# Altium schematic symbol library DSP扩展板.SCHLIB: 21 symbols
Pins are listed as number, name and electrical type; pins without a type are passive.

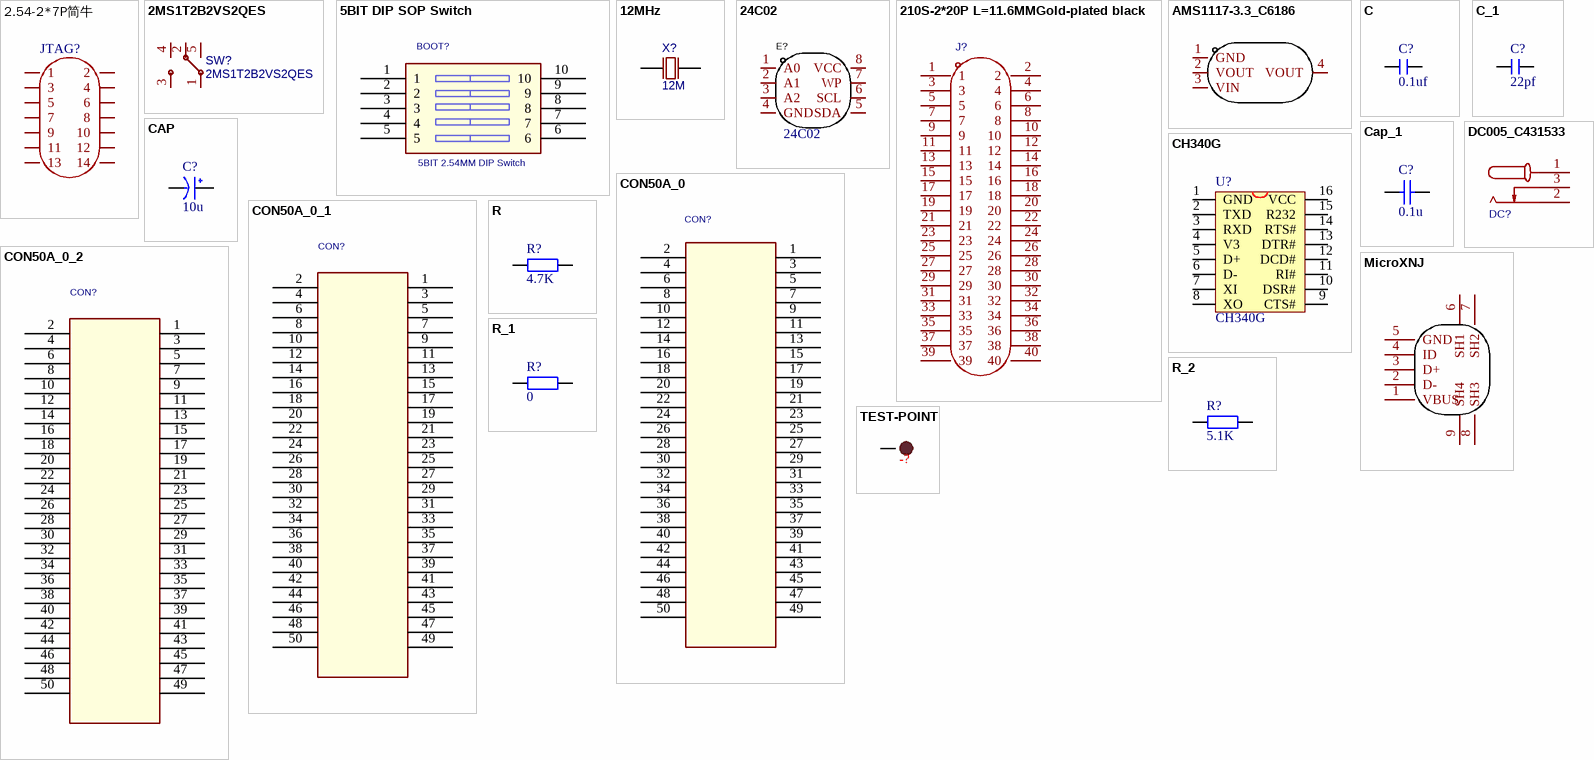
[diagram p0: symbols 2.54-2*7P简牛 to TEST-POINT]

## 2.54-2*7P简牛
designator JTAG?
Manufacturer: BOOMELE(博穆精密); Symbol: HDR-IDC-2.54-2X7P; Device: 2.54-2*7P简牛; Add into BOM: yes; Connector Type: 简牛座; Pitch: 2.54mm; Structure: 2x7P; Holder Type: 直插; Pin Number in each Row: 7; LCSC Part Name: 2.54mm 2x7P 排数:2 每排P数:7; Supplier Part: C11215; Manufacturer Part: 2.54-2*7P简牛; Supplier Footprint: 插件,P=2.54mm; JLCPCB Part Class: 扩展库; Datasheet: https://atta.szlcsc.com/upload/public/pdf/source/20131122/1457706661483.pdf; Supplier: LCSC; Convert to PCB: yes; Row Spacing: 2.54mm; Number of Rows: 2; Contact Material: 黄铜; Contact Plating: 金
footprint IDC-TH_14P-P2.54-V-R2-C7-S2.54
3D model IDC-TH_14P-P2.54-V-R2-C7-S2.54
pins: 1, 2, 3, 4, 5, 6, 7, 8, 9, 10, 11, 12, 13, 14

## 2MS1T2B2VS2QES
designator SW?
BOM_Manufacturer: Dailywell; Contributor: LCSC; BOM_Supplier: LCSC; BOM_Supplier Part: C545202; BOM_Manufacturer Part: 2MS1T2B2VS2QES; BOM_JLCPCB Part Class: Extended Part; spicePre: S; spiceSymbolName: 2MS1T2B2VS2QES
footprint SW-TH_2MS1T2B2VS2QES
pins: 1, 2, 3, 4, 5

## 5BIT DIP SOP Switch
designator BOOT?, comment 5BIT 2.54MM DIP Switch
Manufacturer: KE; Manufacturer PartNumber: DSWB05LHGET; Remark: 5位直插拨码开关 红色,2.54mm
footprint CON_5PIN_DIP_2D54
pins: 1, 2, 3, 4, 5, 6, 7, 8, 9, 10

## 12MHz
designator X?, comment 12M
BOM_Manufacturer: Yangxing Tech; BOM_Manufacturer Part: X49SM12MSB2SC; nameAlias: Frequency; Contributor: LCSC; BOM_Supplier: LCSC; BOM_Supplier Part: C110563; BOM_JLCPCB Part Class: Extended Part; spicePre: X; spiceSymbolName: X49SM12MSB2SC
footprint HC-49S_L11.4-W4.8 - duplicate
footprint HC-49S_L11.4-W4.8 - duplicate
pins: 1 OSC1, 2 OSC2

## 24C02
designator E?
Manufacturer: HX(恒佳兴); Add into BOM: yes; Name: 24C02; Symbol: 24C02; Device: 24C02; LCSC Part Name: 24C02; Supplier Part: C2984961; Manufacturer Part: 24C02; Supplier Footprint: SOP-8; JLCPCB Part Class: Extended Part; Datasheet: https://atta.szlcsc.com/upload/public/pdf/source/20220328/EEDD5B560A30EF54D50A97B6296179D0.pdf; Supplier: LCSC; Convert to PCB: yes
footprint SOP-8_L4.9-W3.9-P1.27-LS6.0-BL
3D model SOP-8_L4.9-W3.9-P1.27-LS6.0-BL-1
pins: 1 A0, 2 A1, 3 A2, 4 GND, 5 SDA, 6 SCL, 7 WP, 8 VCC

## 210S-2*20P L=11.6MMGold-plated black
designator J?  (value not drawn)
Symbol: 210S-2*20P L=11.6MMGold-plated black
footprint HDR-TH_40P-P2.54-V-M-R2-C20-S2.54
pins: 1, 2, 3, 4, 5, 6, 7, 8, 9, 10, 11, 12, 13, 14, 15, 16, 17, 18, 19, 20, 21, 22, 23, 24, 25, 26, 27, 28, 29, 30, 31, 32, 33, 34, 35, 36, 37, 38, 39, 40

## AMS1117-3.3_C6186
designator U?  (value not drawn)
Manufacturer: AMS; Add into BOM: yes; Output Type: 固定; Output Voltage: 3.3V; MAX Output Current: 1A; Power Supply Rejection Ratio (PSRR): 72dB@(120Hz); Dropout Voltage: 1.3V@(800mA); Output Polarity: 正极; Number of Outputs: 1; Symbol: AMS1117-3.3; Device: AMS1117-3.3_C6186; LCSC Part Name: 输出3.3V 1A; Supplier Part: C6186; Manufacturer Part: AMS1117-3.3; Supplier Footprint: SOT-223-3; JLCPCB Part Class: Basic Part; Datasheet: https://atta.szlcsc.com/upload/public/pdf/source/20180727/C6186_7A095716F0823C02F1997A905E26C086.pdf; Supplier: LCSC; Convert to PCB: yes; Maximum Input Voltage: -; standby current: -; Noise: -; Feature: -; Operating Temperature: -
footprint SOT-223-3_L6.5-W3.4-P2.30-LS7.0-BR
pins: 1 GND, 2 VOUT, 3 VIN, 4 VOUT

## C
designator C?, comment 0.1uf
无极性贴片电容; 版权归属: 源创客; BOM名称: 无极性贴片电容; 学习资源: www.ooocke.com
footprint 0603C
pins: 1, 2

## C_1
designator C?, comment 22pf
无极性贴片电容; 版权归属: 源创客; BOM名称: 无极性贴片电容; 学习资源: www.ooocke.com
footprint 0603C
pins: 1, 2

## CAP
designator C?, comment 10u
footprint 5x11mm
pins: 1 VCC, 2 GND

## Cap_1
designator C?, comment 0.1u
Capacitor; Value: 104; Published: 8-Jun-2000; LatestRevisionDate: 17-Jul-2002; LatestRevisionNote: Re-released for DXP Platform.; Publisher: Altium Limited
simulation model CAP (Capacitor)
signal-integrity model Cap
footprint 0603C
pins: 1, 2

## CH340G
designator U?
USB2UART
footprint SOP16M (Small Outline; 16 Leads; Body Width 3.9 mm; Pitch 1.27 mm)
pins: 1 GND, 2 TXD, 3 RXD, 4 V3, 5 D+, 6 D-, 7 XI, 8 XO, 9 CTS#, 10 DSR#, 11 RI#, 12 DCD#, 13 DTR#, 14 RTS#, 15 R232, 16 VCC

## CON50A_0
designator CON?
Manufacturer: 连科; Manufacturer PartNumber: NLWBP05-50C-1.3H; Remark: 0.5mm 50P B2B 3.5mm合高 公头
footprint B2B_0D50_50P_MALE
footprint B2B_0D50_50P_FOUR
footprint PCBComponent_1 - duplicate
footprint NLWBS05-50C-2.2H
footprint PCBComponent_1 - duplicate1
footprint B2B_0D50_50P_FOUR
pins: 1, 2, 3, 4, 5, 6, 7, 8, 9, 10, 11, 12, 13, 14, 15, 16, 17, 18, 19, 20, 21, 22, 23, 24, 25, 26, 27, 28, 29, 30, 31, 32, 33, 34, 35, 36, 37, 38, 39, 40, 41, 42, 43, 44, 45, 46, 47, 48, 49, 50

## CON50A_0_1
designator CON?
Manufacturer: 连科; Manufacturer PartNumber: NLWBS05-50C-2.2H; Remark: 0.5mm 50P B2B 3.5mm合高 母头; ComponentLink1Description: New link; ComponentLink1URL: *; Parameter 1: *
footprint B2B_0D50_50P_FEMALE
footprint B2B_0D50_50P_FOUR
footprint B2B_0D50_50P_FOUR
footprint Model Name (Footprint not found)
footprint NLWBS05-50C-2.2H
footprint NLWBS05-50C-2.2H
footprint NLWBS05-50C-2.2H
footprint B2B_0D50_50P_FOUR
pins: 1, 2, 3, 4, 5, 6, 7, 8, 9, 10, 11, 12, 13, 14, 15, 16, 17, 18, 19, 20, 21, 22, 23, 24, 25, 26, 27, 28, 29, 30, 31, 32, 33, 34, 35, 36, 37, 38, 39, 40, 41, 42, 43, 44, 45, 46, 47, 48, 49, 50

## CON50A_0_2
designator CON?
Manufacturer: 连科; Manufacturer PartNumber: NLWBS05-50C-2.2H; Remark: 0.5mm 50P B2B 3.5mm合高 母头
footprint B2B_0D50_50P_FEMALE
footprint B2B_0D50_50P_FOUR
footprint Model Name (Footprint not found)
footprint PCBComponent_1 - duplicate
footprint PCBComponent_1
footprint PCBComponent_1
footprint B2B_0D50_50P_FOUR
footprint NLWBS05-50C-2.2H
pins: 1, 2, 3, 4, 5, 6, 7, 8, 9, 10, 11, 12, 13, 14, 15, 16, 17, 18, 19, 20, 21, 22, 23, 24, 25, 26, 27, 28, 29, 30, 31, 32, 33, 34, 35, 36, 37, 38, 39, 40, 41, 42, 43, 44, 45, 46, 47, 48, 49, 50

## DC005_C431533
designator DC?  (value not drawn)
Symbol: DC005_C431533
footprint DC-IN-TH_DC005
pins: 1, 2, 3

## MicroXNJ
designator USB?  (value not drawn)
Manufacturer: SHOU HAN(首韩); Add into BOM: yes; Connector Type: Micro-B; Gender: 母; Number of Ports: 1; Number of Contacts: 5P; Current Rating - Power (Max): 1A; Symbol: MICROXNJ; Device: MicroXNJ; Supplier: LCSC; Supplier Part: C404969; Manufacturer Part: MicroXNJ; JLCPCB Part Class: Extended Part; LCSC Part Name: Micro-B 母 卧贴; Supplier Footprint: SMD; Datasheet: https://atta.szlcsc.com/upload/public/pdf/source/20220415/2494EDFF499AF6F852F7C820374B6AF3.pdf; Convert to PCB: yes; Standard: USB 2.0; Mounting Style: 卧贴; Operating Temperature Range: -20℃~+85℃
footprint MICRO-USB-SMD_MICROXNJ
pins: 1 VBUS, 2 D-, 3 D+, 4 ID, 5 GND, 6 SH1, 7 SH2, 8 SH3, 9 SH4

## R
designator R?, comment 4.7K
贴片电阻; 版权归属: 源创客; BOM名称: 贴片电阻; 学习资源: www.ooocke.com
footprint 0603R
pins: 1, 2

## R_1
designator R?, comment 0
贴片电阻; 版权归属: 源创客; BOM名称: 贴片电阻; 学习资源: www.ooocke.com
footprint 0603R
pins: 1, 2

## R_2
designator R?, comment 5.1K
贴片电阻; 版权归属: 源创客; BOM名称: 贴片电阻; 学习资源: www.ooocke.com
footprint 0603R
pins: 1, 2

## TEST-POINT
designator -?, comment TEST POINT  (value not drawn)
测试点
footprint TEST
pins: 1